# Altium footprint library debug_output.PcbLib: 106 footprints (part 3 of 7)
Each footprint in its own frame and in the unit in brackets; x right, y up, seen from the top. Pads: shape width x height; smd on the part's side, far side on the other; paste and mask are expansions set on the pad; w line width, h text height; cw(c..) or ccw(c..) is an arc to the next point about the centre after c.
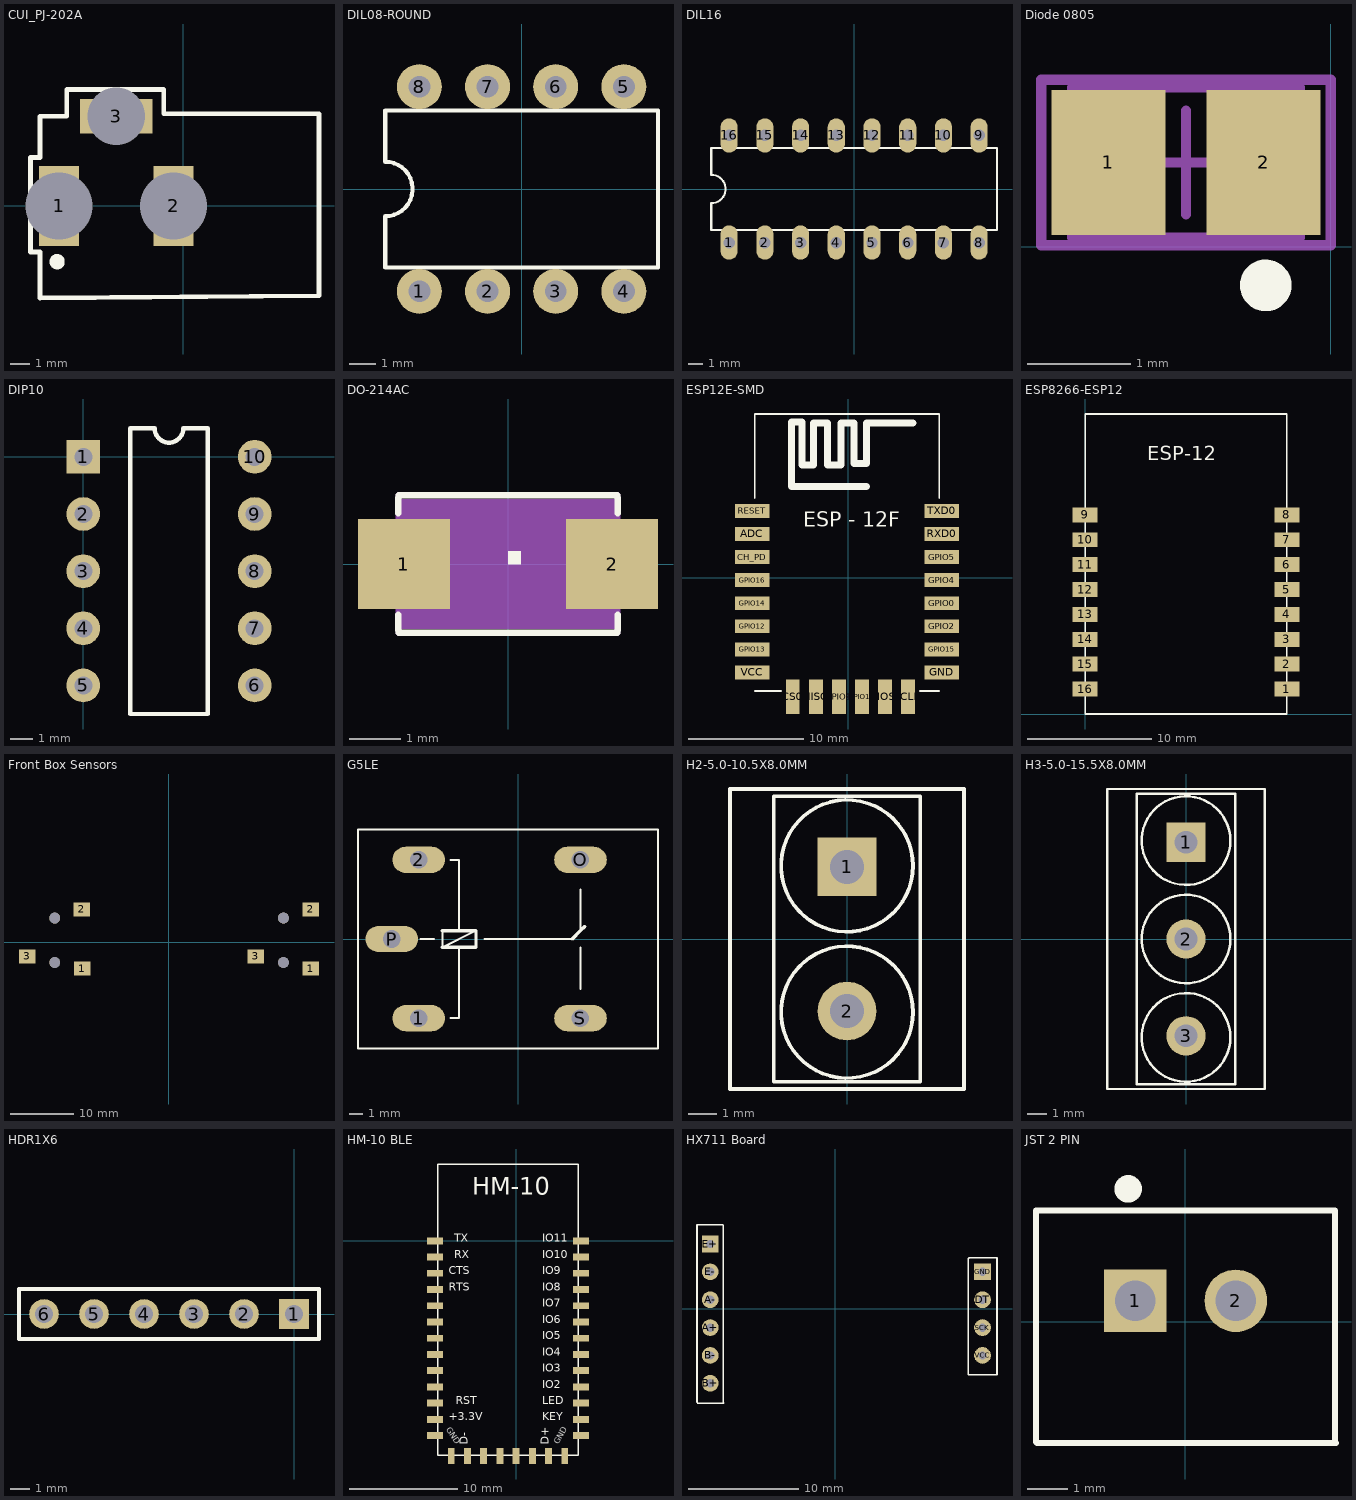
[diagram p2: the footprints below, top view; thin cyan lines are the x and y axes]

## CUI_PJ-202A [mm] "2.0 mm Center Pin, 2.5 A, Right Angle, Through Hole, Kinked Pins, Dc Power Jack Connector"
pads (3):
  rect 2.1x4.2 hole 3.5 square: 1(-6.5,0) 2(-0.5,0)
  rect 3.8x1.8 hole 3 square: 3(-3.5,4.7)
Top Overlay:
  circle w0.4: c-6.604,-2.921 r0.2
  lines w0.254: -7.493,3.302 -7.493,2.54 ; -7.493,2.54 -8.001,2.54 -8.001,-2.413 -7.493,-2.413 -7.493,-4.826 7.112,-4.702 7.112,4.826 -1.016,4.826 -1.016,6.096 -6.096,6.096 -6.096,4.699 -7.493,4.7 -7.493,2.54
Mechanical 2:
  lines w0: -7,-1.75 -7,1.75 -6,1.75 -6,-1.75 -7,-1.75 ; -5,4.2 -2,4.2 -2,5.2 -5,5.2 -5,4.2 ; -1,-1.5 -1,1.5 0,1.5 0,-1.5 -1,-1.5
3D body "119.STEP": height 11.2, standoff -3.4, extent -6.596,-4.5 7.104,5.05

## DIL08-ROUND [mil]
pads (8):
  round 66 hole 32: 1(-150,-150) 2(-50,-150) 3(50,-150) 4(150,-150) 5(150,150) 6(50,150) 7(-50,150) 8(-150,150)
Top Overlay:
  lines w6: -200,-115 -200,-40 ccw(c-200,0) -200,40 -200,115 200,115 200,-115 -200,-115
3D body "DIP8.STEP": height 151.57, standoff -78.74, extent -181.1,-154.92 181.1,154.92

## DIL16 [mil]
pads (16):
  oval 48x96 hole 32: 1(-350,-150) 2(-250,-150) 3(-150,-150) 4(-50,-150) 5(50,-150) 6(150,-150) 7(250,-150) 8(350,-150) 9(350,150) 10(250,150) 11(150,150) 12(50,150) 13(-50,150) 14(-150,150) 15(-250,150) 16(-350,150)
Top Overlay:
  lines w6: -400,-115 -400,-40 ccw(c-400,0) -400,40 -400,115 400,115 400,-115 -400,-115
3D body "DIP16.SLDPRT": height 180.76, standoff -88.93, extent -387,-165.86 380.72,169.85

## Diode 0805 [mm]
pads (2):
  rect 1.1x1.4 smd: 1(-2.147,0.813) 2(-0.647,0.813)
Top Overlay:
  circle w0.25: c-0.626,-0.375 r0.125
Mechanical 13:
  lines w0.1: -2.497,0.088 -2.497,1.538 -0.297,1.538 -0.297,0.088 -2.497,0.088
Mechanical 15:
  lines w0.1: -1.897,0.813 -0.897,0.813 ; -1.397,0.313 -1.397,1.313 ; -2.797,0.013 -2.797,1.613 0.003,1.613 0.003,0.013 -2.797,0.013
3D body "User Library-0805_D.STEP": height -0.43, standoff -1.38, extent -2.497,0.076 -0.297,1.526

## DIP10 [mm]
pads (10):
  rect 1.5x1.5 hole 0.8: 1(0,0)
  round 1.5 hole 0.8: 2(0,-2.54) 3(0,-5.08) 4(0,-7.62) 5(0,-10.16) 6(7.62,-10.16) 7(7.62,-7.62) 8(7.62,-5.08) 9(7.62,-2.54) 10(7.62,0)
Top Overlay:
  lines w0.2: 2.085,-11.43 2.085,1.27 3.175,1.27 ccw(c3.81,1.27) 4.445,1.27 5.535,1.27 5.535,-11.43 2.085,-11.43
3D body "User Library-relay1.STEP": height 6, standoff -2.5, extent -0.817,-12.054 8.183,1.946

## DO-214AC [mil]
pads (2):
  rect 70.87x69.69 smd: 1(-80.39,0) 2(80.39,0)
Top Overlay:
  region: 0,0 10,0 10,10 0,10
  lines w5: -84.65,-51.18 -84.65,-39.37 ; -84.65,39.37 -84.65,51.18 ; -84.45,-53.15 84.45,-53.15 ; -84.45,53.15 84.45,53.15 ; 84.65,-51.18 84.65,-39.37 ; 84.65,39.37 84.65,51.18
Mechanical 16:
  rectangle: -85,-50 85,50
  lines w5: -84.45,-53.15 -84.45,53.15 ; 84.45,-53.15 84.45,53.15
3D body "Diode SMA (1).stp": height 94.95, standoff 0, extent -101.88,-58 106,56.96

## ESP12E-SMD [mm]
pads (22):
  rect 3x1.2 smd: ADC(-8.3,3.8) CH_PD(-8.3,1.8) GND(8.1,-8.2) GPIO0(8.1,-2.2) GPIO2(8.1,-4.2) GPIO4(8.1,-0.2) GPIO5(8.1,1.8) GPIO12(-8.3,-4.2) GPIO13(-8.3,-6.2) GPIO14(-8.3,-2.2) GPIO15(8.1,-6.2) GPIO16(-8.3,-0.2) RESET(-8.3,5.8) RXD0(8.1,3.8) TXD0(8.1,5.8) VCC(-8.3,-8.2)
  rect 1.2x3 smd: CS0(-4.8,-10.3) GPIO9(-0.8,-10.3) GPIO10(1.2,-10.3) MISO(-2.8,-10.3) MOSI(3.2,-10.3) SCLK(5.2,-10.3)
Top Overlay:
  lines w0.15: -8.1,-9.8 -5.8,-9.8 ; -8.1,6.9 -8.1,14.2 7.9,14.2 7.9,6.9 ; 6.2,-9.8 7.9,-9.8
  lines w0.61: -4.9,8.5 -4.9,7.9 1.6,7.9 ; -4.9,8.6 -4.9,13.5 -4,13.5 -4,9.8 -3,9.8 -3,13.4 -1.8,13.4 -1.8,9.8 -0.6,9.8 -0.6,13.4 0.5,13.4 0.5,9.9 1.6,9.9 1.6,13.4 5.6,13.4
  text "ESP - 12F" at -3.9,4 h2.2
3D body "ESP-12F.step": height 2.85, standoff -0.01, extent -8.11,-9.81 7.91,14.2

## ESP8266-ESP12 [mm]
pads (16):
  rect 2x1.2 smd: 1(16.2,2) 2(16.2,4) 3(16.2,6) 4(16.2,8) 5(16.2,10) 6(16.2,12) 7(16.2,14) 8(16.2,16) 9(0,16) 10(0,14) 11(0,12) 12(0,10) 13(0,8) 14(0,6) 15(0,4) 16(0,2)
Top Overlay:
  lines w0.127: 0,0 0,24.1 16.2,24.1 16.2,0 0,0
  text "ESP-12" at 5,20 h1.97
3D body "ESP-12F.step": height 2.85, standoff -0.01, extent -0.01,0.49 16.01,24.5

## Front Box Sensors [mm]
pads (10):
  rect 2.6x2.2 all layers, no hole: 1(-13.625,-4.2) 1(22.375,-4.2) 2(-13.65,5.15) 2(22.35,5.15) 3(-22.25,-2.275) 3(13.75,-2.275)
  round 1.7 hole 1.7: ""(-17.925,-3.225) ""(-17.925,3.775) ""(18.075,-3.225) ""(18.075,3.775)
3D body "HC-SR04-UltrasonicSensor v7.step": height 29.5, standoff 3.3, extent -22.675,-7.7 22.775,10.09
3D body "HeaderFemale.SLDPRT": height 9.6, standoff 0, extent -4.634,8.575 5.225,11.075
3D body "CUI_SJ-3523-SMT-TR.step": height 5, standoff -0.8, extent -22.45,-9.2 -13.45,7.8
3D body "CUI_SJ-3523-SMT-TR.step": height 5, standoff -0.8, extent 13.55,-9.2 22.55,7.8

## G5LE [mil]
pads (5):
  oval 156x78 hole 52: 1(-295,-235) 2(-295,235) O(185,235) P(-375,0) S(185,-235)
Top Overlay:
  lines w6: -290,0 -250,0 ; -225,25 -225,-25 -125,25 ; -200,-235 -175,-235 -175,-25 ; -200,235 -175,235 -175,25 ; -100,0 160,0 ; 185,-148 185,-25 ; 185,25 185,147 ; -475,-325 -475,325 415,325 415,-325 -475,-325
  lines w10: -225,-25 -175,-25 -125,-25 -125,25 -175,25 -225,25 ; 160,0 185,25 198,37
3D body "OMRON G5LE Series.stp": height 728.35, standoff -137.8, extent -435.39,-307.09 415,307.09

## H2-5.0-10.5X8.0MM [mil]
pads (2):
  rect 80x80 hole 46: 1(0,98.43)
  round 80 hole 46: 2(0,-98.43)
Top Overlay:
  circle w5: c0,100 r90.14
  circle w5: c0,-100 r90.14
  lines w5: -160,-205 160,-205 160,205 -160,205 -160,-205 ; -100,-195 100,-195 100,195 -100,195 -100,-195
3D body "Screw Terminal Block 5mm.SLDPRT": height 496.06, standoff -169.29, extent -174.33,-196.66 180,220.66

## H3-5.0-15.5X8.0MM [mil]
pads (3):
  rect 80x80 hole 46: 1(0,196.85)
  round 80 hole 46: 2(0,0) 3(0,-196.85)
Top Overlay:
  circle w5: c0,200 r90.14
  circle w5: c0,0 r90.14
  circle w5: c0,-200 r90.14
  lines w5: -160,-305 160,-305 160,305 -160,305 -160,-305 ; -100,-295 100,-295 100,295 -100,295 -100,-295
3D body: height 393.7, standoff 3.94, extent -160,-306 160,305

## HDR1X6 [mm] "Connector; Header; 6 Position"
pads (6):
  rect 1.5x1.5 hole 0.9: 1(0,0)
  round 1.5 hole 0.9: 2(-2.54,0) 3(-5.08,0) 4(-7.62,0) 5(-10.16,0) 6(-12.7,0)
Top Overlay:
  lines w0.2: -13.97,-1.27 -13.97,1.27 1.27,1.27 1.27,-1.27 -13.97,-1.27

## HM-10 BLE [mm] "BLE SMD"
pads (34):
  rect 1.5x0.635 smd: 1(-7.5,0) 2(-7.5,-1.5) 3(-7.5,-3) 4(-7.5,-4.5) 5(-7.5,-6) 6(-7.5,-7.5) 8(-7.5,-10.5) 9(-7.5,-12) 10(-7.5,-13.5) 11(-7.5,-15) 12(-7.5,-16.5) 13(-7.5,-18) 22(6,-18) 23(6,-16.5) 24(6,-15) 25(6,-13.5) 26(6,-12) 27(6,-10.5) 28(6,-9) 29(6,-7.5) 30(6,-6) 31(6,-4.5) 32(6,-3) 33(6,-1.5) 34(6,0) $7(-7.5,-9)
  rect 0.635x1.5 smd: 14(-6,-19.875) 15(-4.5,-19.875) 16(-3,-19.875) 17(-1.5,-19.875) 18(0,-19.875) 19(1.5,-19.875) 20(3,-19.875) 21(4.5,-19.875)
Top Overlay:
  lines w0.127: -7.25,-19.8 -7.25,7.1 5.75,7.1 5.75,-19.8 -7.25,-19.8
  text "HM-10" at -4.064,3.683 h2.76
  text "IO11" at 2.417,-0.381 h1.26
  text "IO10" at 2.417,-1.881 h1.26
  text "IO9" at 2.417,-3.381 h1.26
  text "IO8" at 2.417,-4.881 h1.26
  text "IO7" at 2.417,-6.381 h1.26
  text "IO6" at 2.417,-7.881 h1.26
  text "IO5" at 2.417,-9.381 h1.26
  text "IO4" at 2.417,-10.881 h1.26
  text "IO3" at 2.417,-12.381 h1.26
  text "IO2" at 2.417,-13.881 h1.26
  text "LED" at 2.417,-15.381 h1.26
  text "KEY" at 2.417,-16.881 h1.26
  text "GND" at 4.1,-18.959 h0.94
  text "D+" at 3.302,-18.852 h1.26
  text "D-" at -4.191,-18.852 h1.26
  text "GND" at -6.64,-17.558 h0.94
  text "+3.3V" at -6.211,-16.881 h1.26
  text "RST" at -5.576,-15.381 h1.26
  text "RTS" at -6.211,-4.881 h1.26
  text "CTS" at -6.211,-3.381 h1.26
  text "RX" at -5.703,-1.881 h1.26
  text "TX" at -5.703,-0.381 h1.26
3D body "HC-06.SLDPRT": height 1.63, standoff 0, extent -7.262,-19.812 5.738,7.088

## HX711 Board [mil]
pads (10):
  round 60 hole 30: A+(-448.76,-67.48) A-(-448.76,32.52) B+(-448.76,-267.48) B-(-448.76,-167.48) DT(528.74,32.52) E-(-448.76,132.52) SCK(528.74,-67.48) VCC(528.74,-167.48)
  rect 60x60 hole 30: E+(-448.76,232.52) GND(528.74,132.52)
Top Overlay:
  lines w5.91: 477.36,-237.2 477.36,179.13 481.3,183.07 580.71,183.07 580.71,181.1 580.71,-236.22 579.72,-237.2 478.35,-237.2 ; 486.22,-237.2 573.82,-237.2 ; -496.06,-335.63 -496.06,301.18 -403.54,301.18 -401.57,299.21 -401.57,-337.6 -400.59,-338.58 -493.11,-338.58 -496.06,-335.63
3D body: height 374.02, standoff 334.65, extent -713.74,-397.5 713.75,397.5
3D body "HEADERFEM2P.stp": height 326.77, standoff -125.98, extent -496.01,65.6 -401.52,299.45
3D body "HEADERFEM2P.stp": height 326.77, standoff -125.98, extent 481.49,-234.4 575.98,-0.55
3D body "HEADERFEM2P.stp": height 326.77, standoff -125.98, extent -496.01,-334.4 -401.52,-100.55

## JST 2 PIN [mm] "BATTERY IN"
pads (2):
  rect 1.55x1.55 hole 1: 1(-1.25,0.525)
  round 1.55 hole 1: 2(1.25,0.525)
Top Overlay:
  circle w0.5: c-1.422,3.302 r0.092
  lines w0.15: -3.708,-2.972 -3.683,-2.997 3.734,-2.997 3.708,-2.972 3.708,2.769 -3.708,2.769 -3.708,-2.972
3D body "JST 2pin.stp": height 6.85, standoff -3.45, extent -3.715,-2.946 3.715,2.781